# Altium integrated library SN65HVD75DR.IntLib: 1 symbol
Pins are listed as number, name and electrical type; pins without a type are passive.

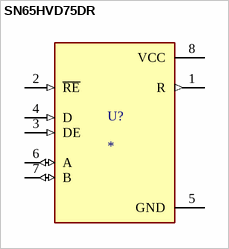
[diagram p0: symbol SN65HVD75DR]

## SN65HVD75DR
designator U?
3.3-V half-duplex RS-485 transceiver with IEC ESD, 20 Mbps; MF: Texas Instruments; MP: SN65HVD75DR; SnapEDA_Link: https://www.snapeda.com/parts/SN65HVD75DR/Texas+Instruments/view-part/?ref=snap; Package: SOIC-8 Texas Instruments; Value: *; Check_prices: https://www.snapeda.com/parts/SN65HVD75DR/Texas+Instruments/view-part/?ref=eda
footprint SOIC127P599X175-8N
pins: 1 R (out), 2 ~{RE} (in), 3 DE (in), 4 D (in), 5 GND (power), 6 A (io), 7 B (io), 8 VCC (power)